# Altium footprint library WR-MPC3.PcbLib: 235 footprints (part 13 of 15)
Each footprint in its own frame and in the unit in brackets; x right, y up, seen from the top. Pads: shape width x height; smd on the part's side, far side on the other; paste and mask are expansions set on the pad; w line width, h text height; cw(c..) or ccw(c..) is an arc to the next point about the centre after c.
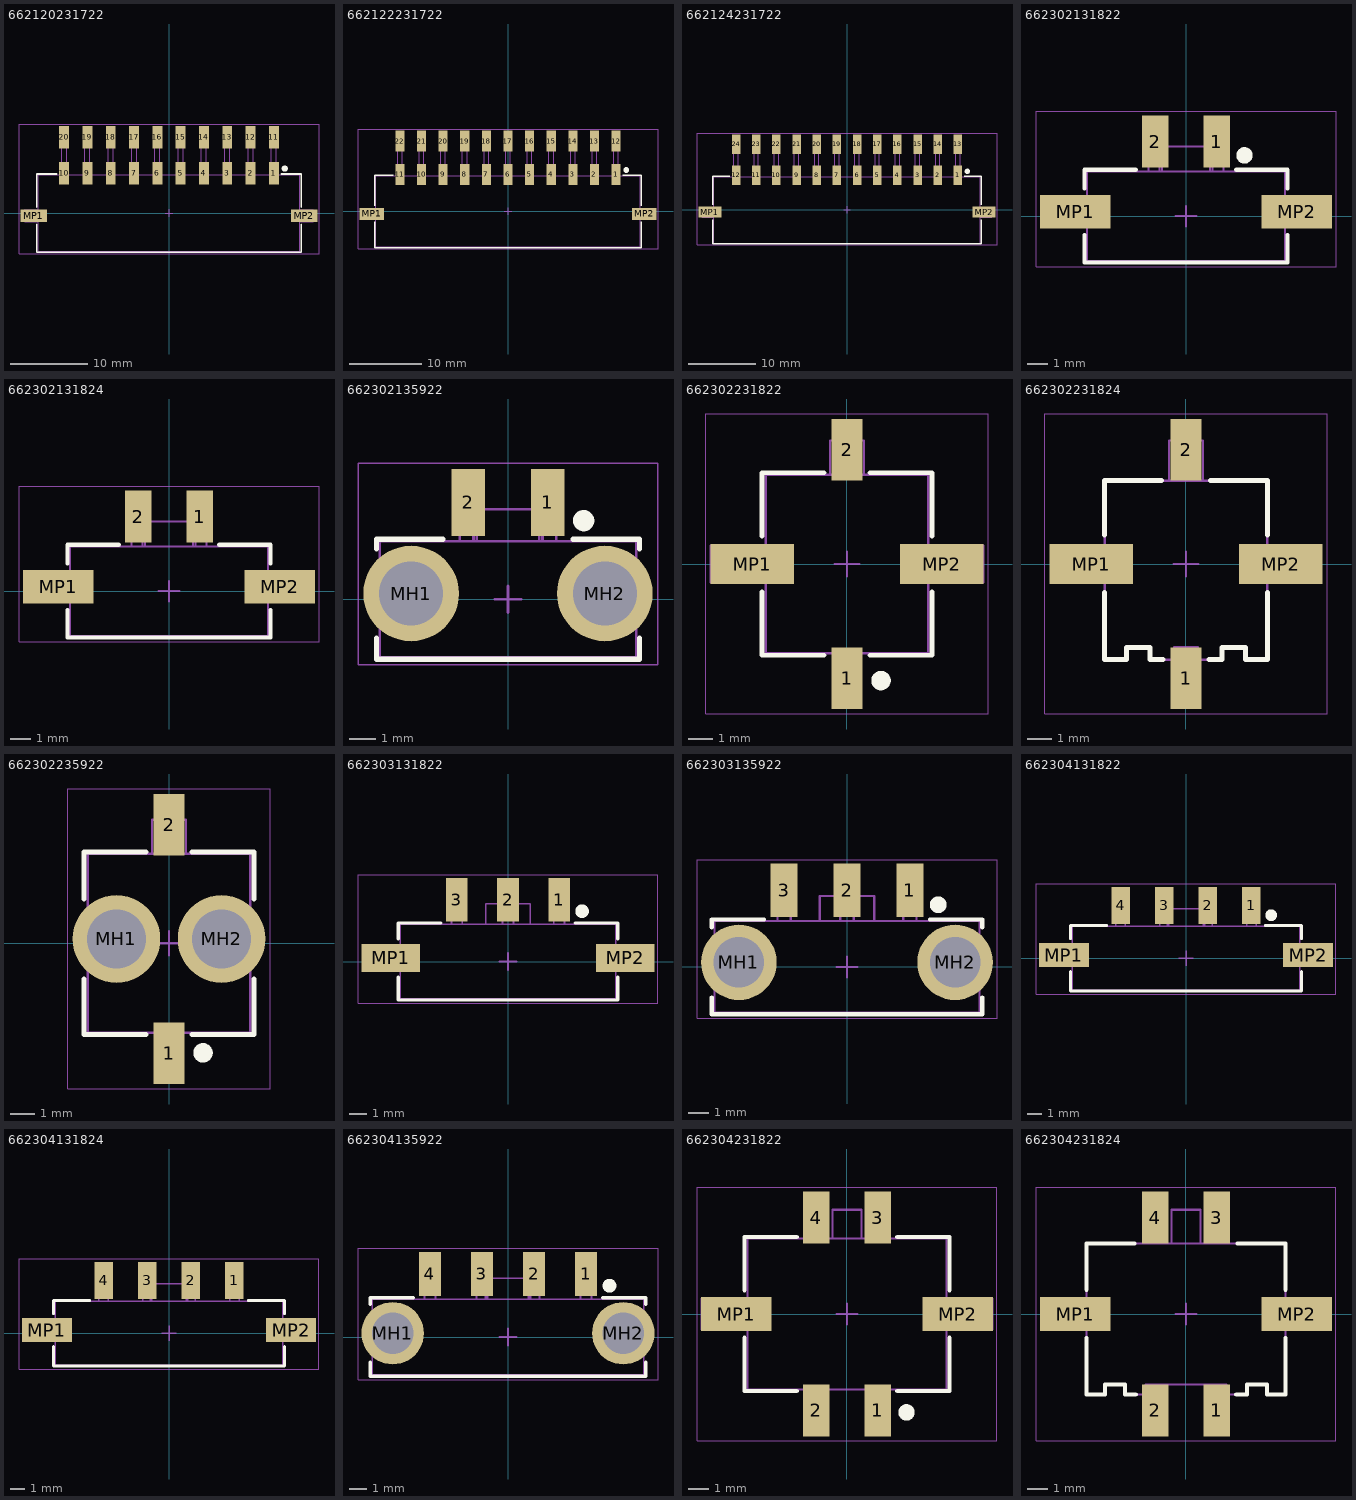
[diagram p12: the footprints below, top view; thin cyan lines are the x and y axes]

## 662120231722 [mm] "3.00mm SMT Male Dual Row Angled Header with SMT Solder Tab (Reel), 20p"
height 8.26
pads (22):
  rect 1.27x2.92 smd: 1(13.5,5.13) 2(10.5,5.13) 3(7.5,5.13) 4(4.5,5.13) 5(1.5,5.13) 6(-1.5,5.13) 7(-4.5,5.13) 8(-7.5,5.13) 9(-10.5,5.13) 10(-13.5,5.13) 11(13.5,9.75) 12(10.5,9.75) 13(7.5,9.75) 14(4.5,9.75) 15(1.5,9.75) 16(-1.5,9.75) 17(-4.5,9.75) 18(-7.5,9.75) 19(-10.5,9.75) 20(-13.5,9.75)
  rect 3.43x1.65 smd: MP1(-17.395,-0.35) MP2(17.395,-0.35)
Top Overlay:
  circle w0.4: c14.9,5.725 r0.2
  lines w0.2: -17,-1.475 -17,-5.025 17,-5.025 17,-1.475 ; -17,0.775 -17,5.025 -14.45,5.025 ; 14.45,5.025 17,5.025 17,0.775
Top Assembly:
  lines w0.1: -16.85,-1.1 -18.55,-1.1 -18.55,0.4 -16.85,0.4 ; -13.82,4.95 -13.82,10.95 -13.18,10.95 -13.18,4.95 ; -13.82,6.3 -13.18,6.3 ; -10.82,4.95 -10.82,10.95 -10.18,10.95 -10.18,4.95 ; -10.82,6.3 -10.18,6.3 ; -7.82,4.95 -7.82,10.95 -7.18,10.95 -7.18,4.95 ; -7.82,6.3 -7.18,6.3 ; -4.82,4.95 -4.82,10.95 -4.18,10.95 -4.18,4.95 ; -4.82,6.3 -4.18,6.3 ; -1.82,4.95 -1.82,10.95 -1.18,10.95 -1.18,4.95 ; -1.82,6.3 -1.18,6.3 ; 1.18,4.95 1.18,10.95 1.82,10.95 1.82,4.95 ; 1.18,6.3 1.82,6.3 ; 4.18,4.95 4.18,10.95 4.82,10.95 4.82,4.95 ; 4.18,6.3 4.82,6.3 ; 7.18,4.95 7.18,10.95 7.82,10.95 7.82,4.95 ; 7.18,6.3 7.82,6.3 ; 10.18,4.95 10.18,10.95 10.82,10.95 10.82,4.95 ; 10.18,6.3 10.82,6.3 ; 13.18,4.95 13.18,10.95 13.82,10.95 13.82,4.95 ; 13.18,6.3 13.82,6.3 ; 16.85,-1.1 18.55,-1.1 18.55,0.4 16.85,0.4 ; -16.85,-4.95 16.85,-4.95 16.85,4.95 -16.85,4.95 -16.85,-4.95
Top Designator:
  text ".Designator" at -3.647,-0.357 h1
Top 3D Body:
  lines w0.1: -16.85,-1.1 -18.55,-1.1 -18.55,0.4 -16.85,0.4 ; -13.82,4.95 -13.82,10.95 -13.18,10.95 -13.18,4.95 ; -13.82,6.3 -13.18,6.3 ; -10.82,4.95 -10.82,10.95 -10.18,10.95 -10.18,4.95 ; -10.82,6.3 -10.18,6.3 ; -7.82,4.95 -7.82,10.95 -7.18,10.95 -7.18,4.95 ; -7.82,6.3 -7.18,6.3 ; -4.82,4.95 -4.82,10.95 -4.18,10.95 -4.18,4.95 ; -4.82,6.3 -4.18,6.3 ; -1.82,4.95 -1.82,10.95 -1.18,10.95 -1.18,4.95 ; -1.82,6.3 -1.18,6.3 ; 1.18,4.95 1.18,10.95 1.82,10.95 1.82,4.95 ; 1.18,6.3 1.82,6.3 ; 4.18,4.95 4.18,10.95 4.82,10.95 4.82,4.95 ; 4.18,6.3 4.82,6.3 ; 7.18,4.95 7.18,10.95 7.82,10.95 7.82,4.95 ; 7.18,6.3 7.82,6.3 ; 10.18,4.95 10.18,10.95 10.82,10.95 10.82,4.95 ; 10.18,6.3 10.82,6.3 ; 13.18,4.95 13.18,10.95 13.82,10.95 13.82,4.95 ; 13.18,6.3 13.82,6.3 ; 16.85,-1.1 18.55,-1.1 18.55,0.4 16.85,0.4 ; -16.85,-4.95 -16.85,4.95 16.85,4.95 16.85,-4.95 -16.85,-4.95
Top Courtyard:
  lines w0.05: -19.31,-5.225 19.31,-5.225 19.31,11.41 -19.31,11.41 -19.31,-5.225
Top Component Center:
  lines w0.1: -0.5,0 0.5,0 ; 0,-0.5 0,0.5
3D body "662120231722.stp": height 8.78, standoff 0.02, extent -18.55,-4.95 18.55,10.95

## 662122231722 [mm] "3.00mm SMT Male Dual Row Angled Header with SMT Solder Tab (Reel), 22p"
height 8.26
pads (24):
  rect 1.27x2.92 smd: 1(15,5.13) 2(12,5.13) 3(9,5.13) 4(6,5.13) 5(3,5.13) 6(0,5.13) 7(-3,5.13) 8(-6,5.13) 9(-9,5.13) 10(-12,5.13) 11(-15,5.13) 12(15,9.75) 13(12,9.75) 14(9,9.75) 15(6,9.75) 16(3,9.75) 17(0,9.75) 18(-3,9.75) 19(-6,9.75) 20(-9,9.75) 21(-12,9.75) 22(-15,9.75)
  rect 3.43x1.65 smd: MP1(-18.895,-0.35) MP2(18.895,-0.35)
Top Overlay:
  circle w0.4: c16.4,5.725 r0.2
  lines w0.2: -18.5,-1.475 -18.5,-5.025 18.5,-5.025 18.5,-1.475 ; -18.5,0.775 -18.5,5.025 -15.95,5.025 ; 15.95,5.025 18.5,5.025 18.5,0.775
Top Assembly:
  lines w0.1: -18.35,-1.1 -20.05,-1.1 -20.05,0.4 -18.35,0.4 ; -15.32,4.95 -15.32,10.95 -14.68,10.95 -14.68,4.95 ; -15.32,6.3 -14.68,6.3 ; -12.32,4.95 -12.32,10.95 -11.68,10.95 -11.68,4.95 ; -12.32,6.3 -11.68,6.3 ; -9.32,4.95 -9.32,10.95 -8.68,10.95 -8.68,4.95 ; -9.32,6.3 -8.68,6.3 ; -6.32,4.95 -6.32,10.95 -5.68,10.95 -5.68,4.95 ; -6.32,6.3 -5.68,6.3 ; -3.32,4.95 -3.32,10.95 -2.68,10.95 -2.68,4.95 ; -3.32,6.3 -2.68,6.3 ; -0.32,4.95 -0.32,10.95 0.32,10.95 0.32,4.95 ; -0.32,6.3 0.32,6.3 ; 2.68,4.95 2.68,10.95 3.32,10.95 3.32,4.95 ; 2.68,6.3 3.32,6.3 ; 5.68,4.95 5.68,10.95 6.32,10.95 6.32,4.95 ; 5.68,6.3 6.32,6.3 ; 8.68,4.95 8.68,10.95 9.32,10.95 9.32,4.95 ; 8.68,6.3 9.32,6.3 ; 11.68,4.95 11.68,10.95 12.32,10.95 12.32,4.95 ; 11.68,6.3 12.32,6.3 ; 14.68,4.95 14.68,10.95 15.32,10.95 15.32,4.95 ; 14.68,6.3 15.32,6.3 ; 18.35,-1.1 20.05,-1.1 20.05,0.4 18.35,0.4 ; -18.35,-4.95 18.35,-4.95 18.35,4.95 -18.35,4.95 -18.35,-4.95
Top Designator:
  text ".Designator" at -3.647,-0.357 h1
Top 3D Body:
  lines w0.1: -18.35,-1.1 -20.05,-1.1 -20.05,0.4 -18.35,0.4 ; -15.32,4.95 -15.32,10.95 -14.68,10.95 -14.68,4.95 ; -15.32,6.3 -14.68,6.3 ; -12.32,4.95 -12.32,10.95 -11.68,10.95 -11.68,4.95 ; -12.32,6.3 -11.68,6.3 ; -9.32,4.95 -9.32,10.95 -8.68,10.95 -8.68,4.95 ; -9.32,6.3 -8.68,6.3 ; -6.32,4.95 -6.32,10.95 -5.68,10.95 -5.68,4.95 ; -6.32,6.3 -5.68,6.3 ; -3.32,4.95 -3.32,10.95 -2.68,10.95 -2.68,4.95 ; -3.32,6.3 -2.68,6.3 ; -0.32,4.95 -0.32,10.95 0.32,10.95 0.32,4.95 ; -0.32,6.3 0.32,6.3 ; 2.68,4.95 2.68,10.95 3.32,10.95 3.32,4.95 ; 2.68,6.3 3.32,6.3 ; 5.68,4.95 5.68,10.95 6.32,10.95 6.32,4.95 ; 5.68,6.3 6.32,6.3 ; 8.68,4.95 8.68,10.95 9.32,10.95 9.32,4.95 ; 8.68,6.3 9.32,6.3 ; 11.68,4.95 11.68,10.95 12.32,10.95 12.32,4.95 ; 11.68,6.3 12.32,6.3 ; 14.68,4.95 14.68,10.95 15.32,10.95 15.32,4.95 ; 14.68,6.3 15.32,6.3 ; 18.35,-1.1 20.05,-1.1 20.05,0.4 18.35,0.4 ; -18.35,-4.95 -18.35,4.95 18.35,4.95 18.35,-4.95 -18.35,-4.95
Top Courtyard:
  lines w0.05: -20.81,-5.225 20.81,-5.225 20.81,11.41 -20.81,11.41 -20.81,-5.225
Top Component Center:
  lines w0.1: -0.5,0 0.5,0 ; 0,-0.5 0,0.5
3D body "662122231722.stp": height 8.78, standoff 0.02, extent -20.05,-4.95 20.05,10.95

## 662124231722 [mm] "3.00mm SMT Male Dual Row Angled Header with SMT Solder Tab (Reel), 24p"
height 8.26
pads (26):
  rect 1.27x2.92 smd: 1(16.5,5.13) 2(13.5,5.13) 3(10.5,5.13) 4(7.5,5.13) 5(4.5,5.13) 6(1.5,5.13) 7(-1.5,5.13) 8(-4.5,5.13) 9(-7.5,5.13) 10(-10.5,5.13) 11(-13.5,5.13) 12(-16.5,5.13) 13(16.5,9.75) 14(13.5,9.75) 15(10.5,9.75) 16(7.5,9.75) 17(4.5,9.75) 18(1.5,9.75) 19(-1.5,9.75) 20(-4.5,9.75) 21(-7.5,9.75) 22(-10.5,9.75) 23(-13.5,9.75) 24(-16.5,9.75)
  rect 3.43x1.65 smd: MP1(-20.395,-0.35) MP2(20.395,-0.35)
Top Overlay:
  circle w0.4: c17.9,5.725 r0.2
  lines w0.2: -20,-1.475 -20,-5.025 20,-5.025 20,-1.475 ; -20,0.775 -20,5.025 -17.45,5.025 ; 17.45,5.025 20,5.025 20,0.775
Top Assembly:
  lines w0.1: -19.85,-1.1 -21.55,-1.1 -21.55,0.4 -19.85,0.4 ; -16.82,4.95 -16.82,10.95 -16.18,10.95 -16.18,4.95 ; -16.82,6.3 -16.18,6.3 ; -13.82,4.95 -13.82,10.95 -13.18,10.95 -13.18,4.95 ; -13.82,6.3 -13.18,6.3 ; -10.82,4.95 -10.82,10.95 -10.18,10.95 -10.18,4.95 ; -10.82,6.3 -10.18,6.3 ; -7.82,4.95 -7.82,10.95 -7.18,10.95 -7.18,4.95 ; -7.82,6.3 -7.18,6.3 ; -4.82,4.95 -4.82,10.95 -4.18,10.95 -4.18,4.95 ; -4.82,6.3 -4.18,6.3 ; -1.82,4.95 -1.82,10.95 -1.18,10.95 -1.18,4.95 ; -1.82,6.3 -1.18,6.3 ; 1.18,4.95 1.18,10.95 1.82,10.95 1.82,4.95 ; 1.18,6.3 1.82,6.3 ; 4.18,4.95 4.18,10.95 4.82,10.95 4.82,4.95 ; 4.18,6.3 4.82,6.3 ; 7.18,4.95 7.18,10.95 7.82,10.95 7.82,4.95 ; 7.18,6.3 7.82,6.3 ; 10.18,4.95 10.18,10.95 10.82,10.95 10.82,4.95 ; 10.18,6.3 10.82,6.3 ; 13.18,4.95 13.18,10.95 13.82,10.95 13.82,4.95 ; 13.18,6.3 13.82,6.3 ; 16.18,4.95 16.18,10.95 16.82,10.95 16.82,4.95 ; 16.18,6.3 16.82,6.3 ; 19.85,-1.1 21.55,-1.1 21.55,0.4 19.85,0.4 ; -19.85,-4.95 -19.85,4.95 19.85,4.95 19.85,-4.95 -19.85,-4.95
Top Designator:
  text ".Designator" at -3.647,-0.357 h1
Top 3D Body:
  lines w0.1: -19.85,-1.1 -21.55,-1.1 -21.55,0.4 -19.85,0.4 ; -16.82,4.95 -16.82,10.95 -16.18,10.95 -16.18,4.95 ; -16.82,6.3 -16.18,6.3 ; -13.82,4.95 -13.82,10.95 -13.18,10.95 -13.18,4.95 ; -13.82,6.3 -13.18,6.3 ; -10.82,4.95 -10.82,10.95 -10.18,10.95 -10.18,4.95 ; -10.82,6.3 -10.18,6.3 ; -7.82,4.95 -7.82,10.95 -7.18,10.95 -7.18,4.95 ; -7.82,6.3 -7.18,6.3 ; -4.82,4.95 -4.82,10.95 -4.18,10.95 -4.18,4.95 ; -4.82,6.3 -4.18,6.3 ; -1.82,4.95 -1.82,10.95 -1.18,10.95 -1.18,4.95 ; -1.82,6.3 -1.18,6.3 ; 1.18,4.95 1.18,10.95 1.82,10.95 1.82,4.95 ; 1.18,6.3 1.82,6.3 ; 4.18,4.95 4.18,10.95 4.82,10.95 4.82,4.95 ; 4.18,6.3 4.82,6.3 ; 7.18,4.95 7.18,10.95 7.82,10.95 7.82,4.95 ; 7.18,6.3 7.82,6.3 ; 10.18,4.95 10.18,10.95 10.82,10.95 10.82,4.95 ; 10.18,6.3 10.82,6.3 ; 13.18,4.95 13.18,10.95 13.82,10.95 13.82,4.95 ; 13.18,6.3 13.82,6.3 ; 16.18,4.95 16.18,10.95 16.82,10.95 16.82,4.95 ; 16.18,6.3 16.82,6.3 ; 19.85,-1.1 21.55,-1.1 21.55,0.4 19.85,0.4 ; -19.85,-4.95 -19.85,4.95 19.85,4.95 19.85,-4.95 -19.85,-4.95
Top Courtyard:
  lines w0.05: -22.31,-5.225 22.31,-5.225 22.31,11.41 -22.31,11.41 -22.31,-5.225
Top Component Center:
  lines w0.1: -0.5,0 0.5,0 ; 0,-0.5 0,0.5
3D body "662124231722.stp": height 8.78, standoff 0.02, extent -21.55,-4.95 21.55,10.95

## 662302131822 [mm] "3.00mm SMT Male Single Vertical Header with SMT Solder Tab, 2p"
height 9.9
pads (4):
  rect 1.27x2.54 smd: 1(1.5,3.635) 2(-1.5,3.635)
  rect 3.43x1.65 smd: MP1(-5.395,0.215) MP2(5.395,0.215)
Top Overlay:
  circle w0.4: c2.85,2.96 r0.2
  lines w0.2: -4.95,-0.91 -4.95,-2.26 4.95,-2.26 4.95,-0.91 ; -4.95,1.34 -4.95,2.26 -2.45,2.26 ; 2.45,2.26 4.95,2.26 4.95,1.34
Top Assembly:
  lines w0.1: -4.825,-0.42 -6.825,-0.42 -6.825,0.85 -4.825,0.85 ; -1.82,2.185 -1.82,4.315 -1.18,4.315 -1.18,2.185 ; -1.3,2.185 -1.3,3.385 1.3,3.385 1.3,2.185 ; 1.18,2.185 1.18,4.315 1.82,4.315 1.82,2.185 ; 4.825,-0.42 6.825,-0.42 6.825,0.85 4.825,0.85 ; -4.825,-2.185 4.825,-2.185 4.825,2.185 -4.825,2.185 -4.825,-2.185
Top Designator:
  text ".Designator" at -3.647,-0.357 h1
Top 3D Body:
  lines w0.1: -4.825,-0.42 -6.825,-0.42 -6.825,0.85 -4.825,0.85 ; -1.82,2.185 -1.82,4.315 -1.18,4.315 -1.18,2.185 ; -1.3,2.185 -1.3,3.385 1.3,3.385 1.3,2.185 ; 1.18,2.185 1.18,4.315 1.82,4.315 1.82,2.185 ; 4.825,-0.42 6.825,-0.42 6.825,0.85 4.825,0.85 ; -4.825,-2.185 4.825,-2.185 4.825,2.185 -4.825,2.185 -4.825,-2.185
Top Courtyard:
  lines w0.05: -7.31,-2.46 7.31,-2.46 7.31,5.105 -7.31,5.105 -7.31,-2.46
Top Component Center:
  lines w0.1: -0.5,0 0.5,0 ; 0,-0.5 0,0.5
3D body "662302131822.stp": height 10.14, standoff -0.01, extent -6.825,-2.5 6.825,4.315

## 662302131824 [mm] "3.00mm SMT Male Single Vertical Header with SMT Solder Tab, 2p"
height 9.9
pads (4):
  rect 1.27x2.54 smd: 1(1.5,3.635) 2(-1.5,3.635)
  rect 3.43x1.65 smd: MP1(-5.395,0.215) MP2(5.395,0.215)
Top Overlay:
  lines w0.2: -4.95,-0.91 -4.95,-2.26 4.95,-2.26 4.95,-0.91 ; -4.95,1.34 -4.95,2.26 -2.45,2.26 ; 2.45,2.26 4.95,2.26 4.95,1.34
Top Assembly:
  lines w0.1: -4.825,-0.42 -6.825,-0.42 -6.825,0.85 -4.825,0.85 ; -1.82,2.185 -1.82,4.315 -1.18,4.315 -1.18,2.185 ; -1.3,2.185 -1.3,3.385 1.3,3.385 1.3,2.185 ; 1.18,2.185 1.18,4.315 1.82,4.315 1.82,2.185 ; 4.825,-0.42 6.825,-0.42 6.825,0.85 4.825,0.85 ; -4.825,-2.185 -4.825,2.185 4.825,2.185 4.825,-2.185 -4.825,-2.185
Top Designator:
  text ".Designator" at -3.647,-0.357 h1
Top Courtyard:
  lines w0.05: -7.31,-2.46 -7.31,5.105 7.31,5.105 7.31,-2.46 -7.31,-2.46
Top Component Center:
  lines w0.1: -0.5,0 0.5,0 ; 0,-0.5 0,0.5
3D body "662302131824.stp": height 10.14, standoff -0.01, extent -6.825,-2.499 6.825,4.315

## 662302135922 [mm] "3.00mm SMT Male Single Row Vertical Header with THT Retention Clip, 2p"
height 9.9
pads (4):
  rect 1.27x2.54 smd: 1(1.5,3.645) 2(-1.5,3.645)
  round 3.6 hole 2.41: MH1(-3.65,0.215) MH2(3.65,0.215)
Top Overlay:
  circle w0.4: c2.85,2.96 r0.2
  lines w0.2: -4.95,-1.46 -4.95,-2.26 4.95,-2.26 4.95,-1.46 ; -4.95,1.89 -4.95,2.26 -2.45,2.26 ; 2.45,2.26 4.95,2.26 4.95,1.89
Top Assembly:
  lines w0.1: -1.82,2.185 -1.82,4.445 -1.18,4.445 -1.18,2.185 ; -1.3,2.185 -1.3,3.385 1.3,3.385 1.3,2.185 ; 1.18,2.185 1.18,4.445 1.82,4.445 1.82,2.185 ; -4.825,-2.185 -4.825,2.185 4.825,2.185 4.825,-2.185 -4.825,-2.185
Top Designator:
  text ".Designator" at -3.647,-0.357 h1
Top 3D Body:
  lines w0.1: -1.82,2.185 -1.82,4.445 -1.18,4.445 -1.18,2.185 ; -1.3,2.185 -1.3,3.385 1.3,3.385 1.3,2.185 ; 1.18,2.185 1.18,4.445 1.82,4.445 1.82,2.185 ; -4.825,-2.185 -4.825,2.185 4.825,2.185 4.825,-2.185 -4.825,-2.185
Top Courtyard:
  lines w0.05: -5.65,-2.46 -5.65,5.115 5.65,5.115 5.65,-2.46 -5.65,-2.46
Top Component Center:
  lines w0.1: -0.5,0 0.5,0 ; 0,-0.5 0,0.5
3D body "662302135922.stp": height 10.14, standoff -1.9, extent -4.825,-2.5 4.825,4.445

## 662302231822 [mm] "3.00mm SMT Male Dual Row Vertical Header with SMT Solder Tab, 2p"
height 9.9
pads (4):
  rect 1.27x2.54 smd: 1(0,-4.7) 2(0,4.7)
  rect 3.43x1.65 smd: MP1(-3.895,0) MP2(3.895,0)
Top Overlay:
  circle w0.4: c1.4,-4.795 r0.2
  lines w0.2: -3.5,-1.155 -3.5,-3.755 -0.95,-3.755 ; -3.5,1.155 -3.5,3.755 -0.95,3.755 ; 0.95,-3.755 3.5,-3.755 3.5,-1.155 ; 0.95,3.755 3.5,3.755 3.5,1.155
Top Assembly:
  lines w0.1: -3.35,-0.75 -5.6,-0.75 -5.6,0.75 -3.35,0.75 ; -0.7,3.68 -0.7,5.08 0.7,5.08 0.7,3.68 ; -0.32,-3.68 -0.32,-5.698 0.32,-5.698 0.32,-3.68 ; -0.32,3.68 -0.32,5.698 0.32,5.698 0.32,3.68 ; 3.35,-0.75 5.6,-0.75 5.6,0.75 3.35,0.75 ; -3.35,-3.68 3.35,-3.68 3.35,3.68 -3.35,3.68 -3.35,-3.68
Top Designator:
  text ".Designator" at -3.647,-0.357 h1
Top 3D Body:
  lines w0.1: -3.35,-0.75 -5.6,-0.75 -5.6,0.75 -3.35,0.75 ; -0.7,3.68 -0.7,5.08 0.7,5.08 0.7,3.68 ; -0.32,-3.68 -0.32,-5.698 0.32,-5.698 0.32,-3.68 ; -0.32,3.68 -0.32,5.698 0.32,5.698 0.32,3.68 ; 3.35,-0.75 5.6,-0.75 5.6,0.75 3.35,0.75 ; -3.35,-3.68 3.35,-3.68 3.35,3.68 -3.35,3.68 -3.35,-3.68
Top Courtyard:
  lines w0.05: -5.81,-6.17 5.81,-6.17 5.81,6.17 -5.81,6.17 -5.81,-6.17
Top Component Center:
  lines w0.1: -0.5,0 0.5,0 ; 0,-0.5 0,0.5
3D body "662302231822.stp": height 11.43, standoff 0.03, extent -5.6,-5.698 5.6,5.698

## 662302231824 [mm] "3.00mm SMT Male Dual Row Vertical Header with SMT Solder Tab, 2p"
height 9.9
pads (4):
  rect 1.27x2.54 smd: 1(0,-4.7) 2(0,4.7)
  rect 3.43x1.65 smd: MP1(-3.895,0) MP2(3.895,0)
Top Overlay:
  lines w0.2: -3.35,-1.17 -3.35,-3.93 -2.45,-3.93 -2.45,-3.43 -1.48,-3.43 -1.48,-3.93 -0.95,-3.93 ; -3.35,1.18 -3.35,3.43 -1.003,3.43 ; 0.95,-3.93 1.48,-3.93 1.48,-3.43 2.45,-3.43 2.45,-3.93 3.35,-3.93 3.35,-1.17 ; 1.003,3.43 3.35,3.43 3.35,1.18
Top Assembly:
  lines w0.1: -3.35,-0.75 -5.05,-0.75 -5.05,0.75 -3.35,0.75 ; -0.7,3.43 -0.7,5.08 0.7,5.08 0.7,3.43 ; -0.32,-3.43 -0.32,-5.698 0.32,-5.698 0.32,-3.43 ; -0.32,3.43 -0.32,5.698 0.32,5.698 0.32,3.43 ; 3.35,-0.75 5.05,-0.75 5.05,0.75 3.35,0.75 ; -3.35,-3.93 -3.35,3.43 3.35,3.43 3.35,-3.93 2.45,-3.93 2.45,-3.43 1.48,-3.43 1.48,-3.93 0.48,-3.93 0.48,-3.43 -0.48,-3.43 -0.48,-3.93 -1.48,-3.93 -1.48,-3.43 -2.45,-3.43 -2.45,-3.93 -3.35,-3.93
Top Designator:
  text ".Designator" at -3.647,-0.357 h1
Top Courtyard:
  lines w0.05: -5.81,-6.17 5.81,-6.17 5.81,6.17 -5.81,6.17 -5.81,-6.17
Top Component Center:
  lines w0.1: -0.5,0 0.5,0 ; 0,-0.5 0,0.5
3D body "662302231824.stp": height 11.43, standoff 0.03, extent -5.045,-5.698 5.045,5.698

## 662302235922 [mm] "3.00mm SMT Male Dual Row Vertical Header with THT Retention Clip, 2p"
height 9.9
pads (4):
  rect 1.27x2.54 smd: 1(0,-4.52) 2(0,4.88)
  round 3.6 hole 2.41: MH1(-2.16,0.18) MH2(2.16,0.18)
Top Overlay:
  circle w0.4: c1.4,-4.5 r0.2
  lines w0.2: -3.5,-1.455 -3.5,-3.755 -0.95,-3.755 ; -3.5,1.815 -3.5,3.755 -0.95,3.755 ; 0.95,-3.755 3.5,-3.755 3.5,-1.455 ; 0.95,3.755 3.5,3.755 3.5,1.815
Top Assembly:
  lines w0.1: -0.7,3.68 -0.7,5.08 0.7,5.08 0.7,3.68 ; -0.32,-3.68 -0.32,-5.45 0.32,-5.45 0.32,-3.68 ; -0.32,3.68 -0.32,5.95 0.32,5.95 0.32,3.68 ; -3.35,-3.68 3.35,-3.68 3.35,3.68 -3.35,3.68 -3.35,-3.68
Top Designator:
  text ".Designator" at -3.647,-0.357 h1
Top 3D Body:
  lines w0.1: -0.7,3.68 -0.7,5.08 0.7,5.08 0.7,3.68 ; -0.32,-3.68 -0.32,-5.45 0.32,-5.45 0.32,-3.68 ; -0.32,3.68 -0.32,5.95 0.32,5.95 0.32,3.68 ; -3.35,-3.68 3.35,-3.68 3.35,3.68 -3.35,3.68 -3.35,-3.68
Top Courtyard:
  lines w0.05: -4.16,-5.99 -4.16,6.35 4.16,6.35 4.16,-5.99 -4.16,-5.99
Top Component Center:
  lines w0.1: -0.5,0 0.5,0 ; 0,-0.5 0,0.5
3D body "662302235922.stp": height 11.42, standoff -3.08, extent -3.35,-5.45 3.35,5.95

## 662303131822 [mm] "3.00mm SMT Male Single Vertical Header with SMT Solder Tab, 3p"
height 9.9
pads (5):
  rect 1.27x2.54 smd: 1(3,3.635) 2(0,3.635) 3(-3,3.635)
  rect 3.43x1.65 smd: MP1(-6.895,0.215) MP2(6.895,0.215)
Top Overlay:
  circle w0.4: c4.35,2.96 r0.2
  lines w0.2: -6.45,-0.91 -6.45,-2.26 6.45,-2.26 6.45,-0.91 ; -6.45,1.34 -6.45,2.26 -3.95,2.26 ; 3.95,2.26 6.45,2.26 6.45,1.34
Top Assembly:
  lines w0.1: -6.325,-0.42 -8.325,-0.42 -8.325,0.85 -6.325,0.85 ; -3.32,2.185 -3.32,4.315 -2.68,4.315 -2.68,2.185 ; -1.3,2.185 -1.3,3.385 1.3,3.385 1.3,2.185 ; -0.32,2.185 -0.32,4.315 0.32,4.315 0.32,2.185 ; 2.68,2.185 2.68,4.315 3.32,4.315 3.32,2.185 ; 6.325,-0.42 8.325,-0.42 8.325,0.85 6.325,0.85 ; -6.325,-2.185 6.325,-2.185 6.325,2.185 -6.325,2.185 -6.325,-2.185
Top Designator:
  text ".Designator" at -3.647,-0.357 h1
Top 3D Body:
  lines w0.1: -6.325,-0.42 -8.325,-0.42 -8.325,0.85 -6.325,0.85 ; -3.32,2.185 -3.32,4.315 -2.68,4.315 -2.68,2.185 ; -1.3,2.185 -1.3,3.385 1.3,3.385 1.3,2.185 ; -0.32,2.185 -0.32,4.315 0.32,4.315 0.32,2.185 ; 2.68,2.185 2.68,4.315 3.32,4.315 3.32,2.185 ; 6.325,-0.42 8.325,-0.42 8.325,0.85 6.325,0.85 ; -6.325,-2.185 6.325,-2.185 6.325,2.185 -6.325,2.185 -6.325,-2.185
Top Courtyard:
  lines w0.05: -8.81,-2.46 8.81,-2.46 8.81,5.105 -8.81,5.105 -8.81,-2.46
Top Component Center:
  lines w0.1: -0.5,0 0.5,0 ; 0,-0.5 0,0.5
3D body "662303131822.stp": height 10.14, standoff -0.01, extent -8.325,-2.5 8.325,4.315

## 662303135922 [mm] "3.00mm SMT Male Single Row Vertical Header with THT Retention Clip, 3p"
height 9.9
pads (5):
  rect 1.27x2.54 smd: 1(3,3.645) 2(0,3.645) 3(-3,3.645)
  round 3.6 hole 2.41: MH1(-5.15,0.215) MH2(5.15,0.215)
Top Overlay:
  circle w0.4: c4.35,2.96 r0.2
  lines w0.2: -6.45,-1.46 -6.45,-2.26 6.45,-2.26 6.45,-1.46 ; -6.45,1.89 -6.45,2.26 -3.95,2.26 ; 3.95,2.26 6.45,2.26 6.45,1.89
Top Assembly:
  lines w0.1: -3.32,2.185 -3.32,4.445 -2.68,4.445 -2.68,2.185 ; -1.3,2.185 -1.3,3.385 1.3,3.385 1.3,2.185 ; -0.32,2.185 -0.32,4.445 0.32,4.445 0.32,2.185 ; 2.68,2.185 2.68,4.445 3.32,4.445 3.32,2.185 ; -6.325,-2.185 6.325,-2.185 6.325,2.185 -6.325,2.185 -6.325,-2.185
Top Designator:
  text ".Designator" at -3.647,-0.357 h1
Top 3D Body:
  lines w0.1: -3.32,2.185 -3.32,4.445 -2.68,4.445 -2.68,2.185 ; -1.3,2.185 -1.3,3.385 1.3,3.385 1.3,2.185 ; -0.32,2.185 -0.32,4.445 0.32,4.445 0.32,2.185 ; 2.68,2.185 2.68,4.445 3.32,4.445 3.32,2.185 ; -6.325,-2.185 -6.325,2.185 6.325,2.185 6.325,-2.185 -6.325,-2.185
Top Courtyard:
  lines w0.05: -7.15,-2.46 -7.15,5.115 7.15,5.115 7.15,-2.46 -7.15,-2.46
Top Component Center:
  lines w0.1: -0.5,0 0.5,0 ; 0,-0.5 0,0.5
3D body "662303135922.stp": height 10.14, standoff -1.9, extent -6.325,-2.5 6.325,4.445

## 662304131822 [mm] "3.00mm SMT Male Single Vertical Header with SMT Solder Tab, 4p"
height 9.9
pads (6):
  rect 1.27x2.54 smd: 1(4.5,3.635) 2(1.5,3.635) 3(-1.5,3.635) 4(-4.5,3.635)
  rect 3.43x1.65 smd: MP1(-8.395,0.215) MP2(8.395,0.215)
Top Overlay:
  circle w0.4: c5.85,2.96 r0.2
  lines w0.2: -7.95,-0.91 -7.95,-2.26 7.95,-2.26 7.95,-0.91 ; -7.95,1.34 -7.95,2.26 -5.45,2.26 ; 5.45,2.26 7.95,2.26 7.95,1.34
Top Assembly:
  lines w0.1: -7.825,-0.42 -9.825,-0.42 -9.825,0.85 -7.825,0.85 ; -4.82,2.185 -4.82,4.315 -4.18,4.315 -4.18,2.185 ; -1.82,2.185 -1.82,4.315 -1.18,4.315 -1.18,2.185 ; -1.3,2.185 -1.3,3.385 1.3,3.385 1.3,2.185 ; 1.18,2.185 1.18,4.315 1.82,4.315 1.82,2.185 ; 4.18,2.185 4.18,4.315 4.82,4.315 4.82,2.185 ; 7.825,-0.42 9.825,-0.42 9.825,0.85 7.825,0.85 ; -7.825,-2.185 -7.825,2.185 7.825,2.185 7.825,-2.185 -7.825,-2.185
Top Designator:
  text ".Designator" at -3.647,-0.357 h1
Top 3D Body:
  lines w0.1: -7.825,-0.42 -9.825,-0.42 -9.825,0.85 -7.825,0.85 ; -4.82,2.185 -4.82,4.315 -4.18,4.315 -4.18,2.185 ; -1.82,2.185 -1.82,4.315 -1.18,4.315 -1.18,2.185 ; -1.3,2.185 -1.3,3.385 1.3,3.385 1.3,2.185 ; 1.18,2.185 1.18,4.315 1.82,4.315 1.82,2.185 ; 4.18,2.185 4.18,4.315 4.82,4.315 4.82,2.185 ; 7.825,-0.42 9.825,-0.42 9.825,0.85 7.825,0.85 ; -7.825,-2.185 -7.825,2.185 7.825,2.185 7.825,-2.185 -7.825,-2.185
Top Courtyard:
  lines w0.05: -10.31,-2.46 -10.31,5.105 10.31,5.105 10.31,-2.46 -10.31,-2.46
Top Component Center:
  lines w0.1: -0.5,0 0.5,0 ; 0,-0.5 0,0.5
3D body "662304131822.stp": height 10.14, standoff -0.01, extent -9.825,-2.25 9.825,4.315

## 662304131824 [mm] "3.00mm SMT Male Single Vertical Header with SMT Solder Tab, 4p"
height 9.9
pads (6):
  rect 1.27x2.54 smd: 1(4.5,3.635) 2(1.5,3.635) 3(-1.5,3.635) 4(-4.5,3.635)
  rect 3.43x1.65 smd: MP1(-8.395,0.215) MP2(8.395,0.215)
Top Overlay:
  lines w0.2: -7.95,-0.91 -7.95,-2.26 7.95,-2.26 7.95,-0.91 ; -7.95,1.34 -7.95,2.26 -5.45,2.26 ; 5.45,2.26 7.95,2.26 7.95,1.34
Top Assembly:
  lines w0.1: -7.825,-0.42 -9.825,-0.42 -9.825,0.85 -7.825,0.85 ; -4.82,2.185 -4.82,4.315 -4.18,4.315 -4.18,2.185 ; -1.82,2.185 -1.82,4.315 -1.18,4.315 -1.18,2.185 ; -1.3,2.185 -1.3,3.385 1.3,3.385 1.3,2.185 ; 1.18,2.185 1.18,4.315 1.82,4.315 1.82,2.185 ; 4.18,2.185 4.18,4.315 4.82,4.315 4.82,2.185 ; 7.825,-0.42 9.825,-0.42 9.825,0.85 7.825,0.85 ; -7.825,-2.185 7.825,-2.185 7.825,2.185 -7.825,2.185 -7.825,-2.185
Top Designator:
  text ".Designator" at -3.647,-0.357 h1
Top Courtyard:
  lines w0.05: -10.31,-2.46 -10.31,5.105 10.31,5.105 10.31,-2.46 -10.31,-2.46
Top Component Center:
  lines w0.1: -0.5,0 0.5,0 ; 0,-0.5 0,0.5
3D body "662304131824.stp": height 10.14, standoff -0.01, extent -9.825,-2.249 9.825,4.315

## 662304135922 [mm] "3.00mm SMT Male Single Row Vertical Header with THT Retention Clip, 4p"
height 9.9
pads (6):
  rect 1.27x2.54 smd: 1(4.5,3.645) 2(1.5,3.645) 3(-1.5,3.645) 4(-4.5,3.645)
  round 3.6 hole 2.41: MH1(-6.65,0.215) MH2(6.65,0.215)
Top Overlay:
  circle w0.4: c5.85,2.96 r0.2
  lines w0.2: -7.95,-1.46 -7.95,-2.26 7.95,-2.26 7.95,-1.46 ; -7.95,1.89 -7.95,2.26 -5.45,2.26 ; 5.45,2.26 7.95,2.26 7.95,1.89
Top Assembly:
  lines w0.1: -4.82,2.185 -4.82,4.445 -4.18,4.445 -4.18,2.185 ; -1.82,2.185 -1.82,4.445 -1.18,4.445 -1.18,2.185 ; -1.3,2.185 -1.3,3.385 1.3,3.385 1.3,2.185 ; 1.18,2.185 1.18,4.445 1.82,4.445 1.82,2.185 ; 4.18,2.185 4.18,4.445 4.82,4.445 4.82,2.185 ; -7.825,-2.185 7.825,-2.185 7.825,2.185 -7.825,2.185 -7.825,-2.185
Top Designator:
  text ".Designator" at -3.647,-0.357 h1
Top 3D Body:
  lines w0.1: -4.82,2.185 -4.82,4.445 -4.18,4.445 -4.18,2.185 ; -1.82,2.185 -1.82,4.445 -1.18,4.445 -1.18,2.185 ; -1.3,2.185 -1.3,3.385 1.3,3.385 1.3,2.185 ; 1.18,2.185 1.18,4.445 1.82,4.445 1.82,2.185 ; 4.18,2.185 4.18,4.445 4.82,4.445 4.82,2.185 ; -7.825,-2.185 -7.825,2.185 7.825,2.185 7.825,-2.185 -7.825,-2.185
Top Courtyard:
  lines w0.05: -8.65,-2.46 -8.65,5.115 8.65,5.115 8.65,-2.46 -8.65,-2.46
Top Component Center:
  lines w0.1: -0.5,0 0.5,0 ; 0,-0.5 0,0.5
3D body "662304135922.stp": height 10.14, standoff -1.9, extent -7.825,-2.25 7.825,4.445

## 662304231822 [mm] "3.00mm SMT Male Dual Row Vertical Header with SMT Solder Tab, 4p"
height 9.9
pads (6):
  rect 1.27x2.54 smd: 1(1.5,-4.7) 2(-1.5,-4.7) 3(1.5,4.7) 4(-1.5,4.7)
  rect 3.43x1.65 smd: MP1(-5.395,0) MP2(5.395,0)
Top Overlay:
  circle w0.4: c2.9,-4.795 r0.2
  lines w0.2: -5,-1.155 -5,-3.755 -2.45,-3.755 ; -5,1.155 -5,3.755 -2.45,3.755 ; 2.45,-3.755 5,-3.755 5,-1.155 ; 2.45,3.755 5,3.755 5,1.155
Top Assembly:
  lines w0.1: -4.85,-0.75 -7.1,-0.75 -7.1,0.75 -4.85,0.75 ; -1.82,-3.68 -1.82,-5.698 -1.18,-5.698 -1.18,-3.68 ; -1.82,3.68 -1.82,5.698 -1.18,5.698 -1.18,3.68 ; -0.7,3.68 -0.7,5.08 0.7,5.08 0.7,3.68 ; 1.18,-3.68 1.18,-5.698 1.82,-5.698 1.82,-3.68 ; 1.18,3.68 1.18,5.698 1.82,5.698 1.82,3.68 ; 4.85,-0.75 7.1,-0.75 7.1,0.75 4.85,0.75 ; -4.85,-3.68 4.85,-3.68 4.85,3.68 -4.85,3.68 -4.85,-3.68
Top Designator:
  text ".Designator" at -3.647,-0.357 h1
Top 3D Body:
  lines w0.1: -4.85,-0.75 -7.1,-0.75 -7.1,0.75 -4.85,0.75 ; -1.82,-3.68 -1.82,-5.698 -1.18,-5.698 -1.18,-3.68 ; -1.82,3.68 -1.82,5.698 -1.18,5.698 -1.18,3.68 ; -0.7,3.68 -0.7,5.08 0.7,5.08 0.7,3.68 ; 1.18,-3.68 1.18,-5.698 1.82,-5.698 1.82,-3.68 ; 1.18,3.68 1.18,5.698 1.82,5.698 1.82,3.68 ; 4.85,-0.75 7.1,-0.75 7.1,0.75 4.85,0.75 ; -4.85,-3.68 -4.85,3.68 4.85,3.68 4.85,-3.68 -4.85,-3.68
Top Courtyard:
  lines w0.05: -7.31,-6.17 7.31,-6.17 7.31,6.17 -7.31,6.17 -7.31,-6.17
Top Component Center:
  lines w0.1: -0.5,0 0.5,0 ; 0,-0.5 0,0.5
3D body "662304231822.stp": height 11.43, standoff 0.03, extent -7.1,-5.698 7.1,5.698

## 662304231824 [mm] "3.00mm SMT Male Dual Row Vertical Header with SMT Solder Tab, 4p"
height 9.9
pads (6):
  rect 1.27x2.54 smd: 1(1.5,-4.7) 2(-1.5,-4.7) 3(1.5,4.7) 4(-1.5,4.7)
  rect 3.43x1.65 smd: MP1(-5.395,0) MP2(5.395,0)
Top Overlay:
  lines w0.2: -4.85,-1.17 -4.85,-3.93 -3.95,-3.93 -3.95,-3.43 -2.98,-3.43 -2.98,-3.93 -2.45,-3.93 ; -4.85,1.18 -4.85,3.43 -2.503,3.43 ; 2.45,-3.93 2.98,-3.93 2.98,-3.43 3.95,-3.43 3.95,-3.93 4.85,-3.93 4.85,-1.17 ; 2.503,3.43 4.85,3.43 4.85,1.18
Top Assembly:
  lines w0.1: -4.85,-0.75 -6.55,-0.75 -6.55,0.75 -4.85,0.75 ; -1.82,-3.43 -1.82,-5.698 -1.18,-5.698 -1.18,-3.43 ; -1.82,3.43 -1.82,5.698 -1.18,5.698 -1.18,3.43 ; -0.7,3.43 -0.7,5.08 0.7,5.08 0.7,3.43 ; 1.18,-3.43 1.18,-5.698 1.82,-5.698 1.82,-3.43 ; 1.18,3.43 1.18,5.698 1.82,5.698 1.82,3.43 ; 4.85,-0.75 6.55,-0.75 6.55,0.75 4.85,0.75 ; -4.85,-3.93 -4.85,3.43 4.85,3.43 4.85,-3.93 3.95,-3.93 3.95,-3.43 2.98,-3.43 2.98,-3.93 1.98,-3.93 1.98,-3.43 -1.98,-3.43 -1.98,-3.93 -2.98,-3.93 -2.98,-3.43 -3.95,-3.43 -3.95,-3.93 -4.85,-3.93
Top Designator:
  text ".Designator" at -3.647,-0.357 h1
Top Courtyard:
  lines w0.05: -7.31,-6.17 7.31,-6.17 7.31,6.17 -7.31,6.17 -7.31,-6.17
Top Component Center:
  lines w0.1: -0.5,0 0.5,0 ; 0,-0.5 0,0.5
3D body "662304231824.stp": height 11.43, standoff 0.03, extent -6.545,-5.698 6.545,5.698